# Altium footprint library AudioMoth 1.1.PCBLIB: 193 footprints (part 7 of 13)
Each footprint in its own frame and in the unit in brackets; x right, y up, seen from the top. Pads: shape width x height; smd on the part's side, far side on the other; paste and mask are expansions set on the pad; w line width, h text height; cw(c..) or ccw(c..) is an arc to the next point about the centre after c.
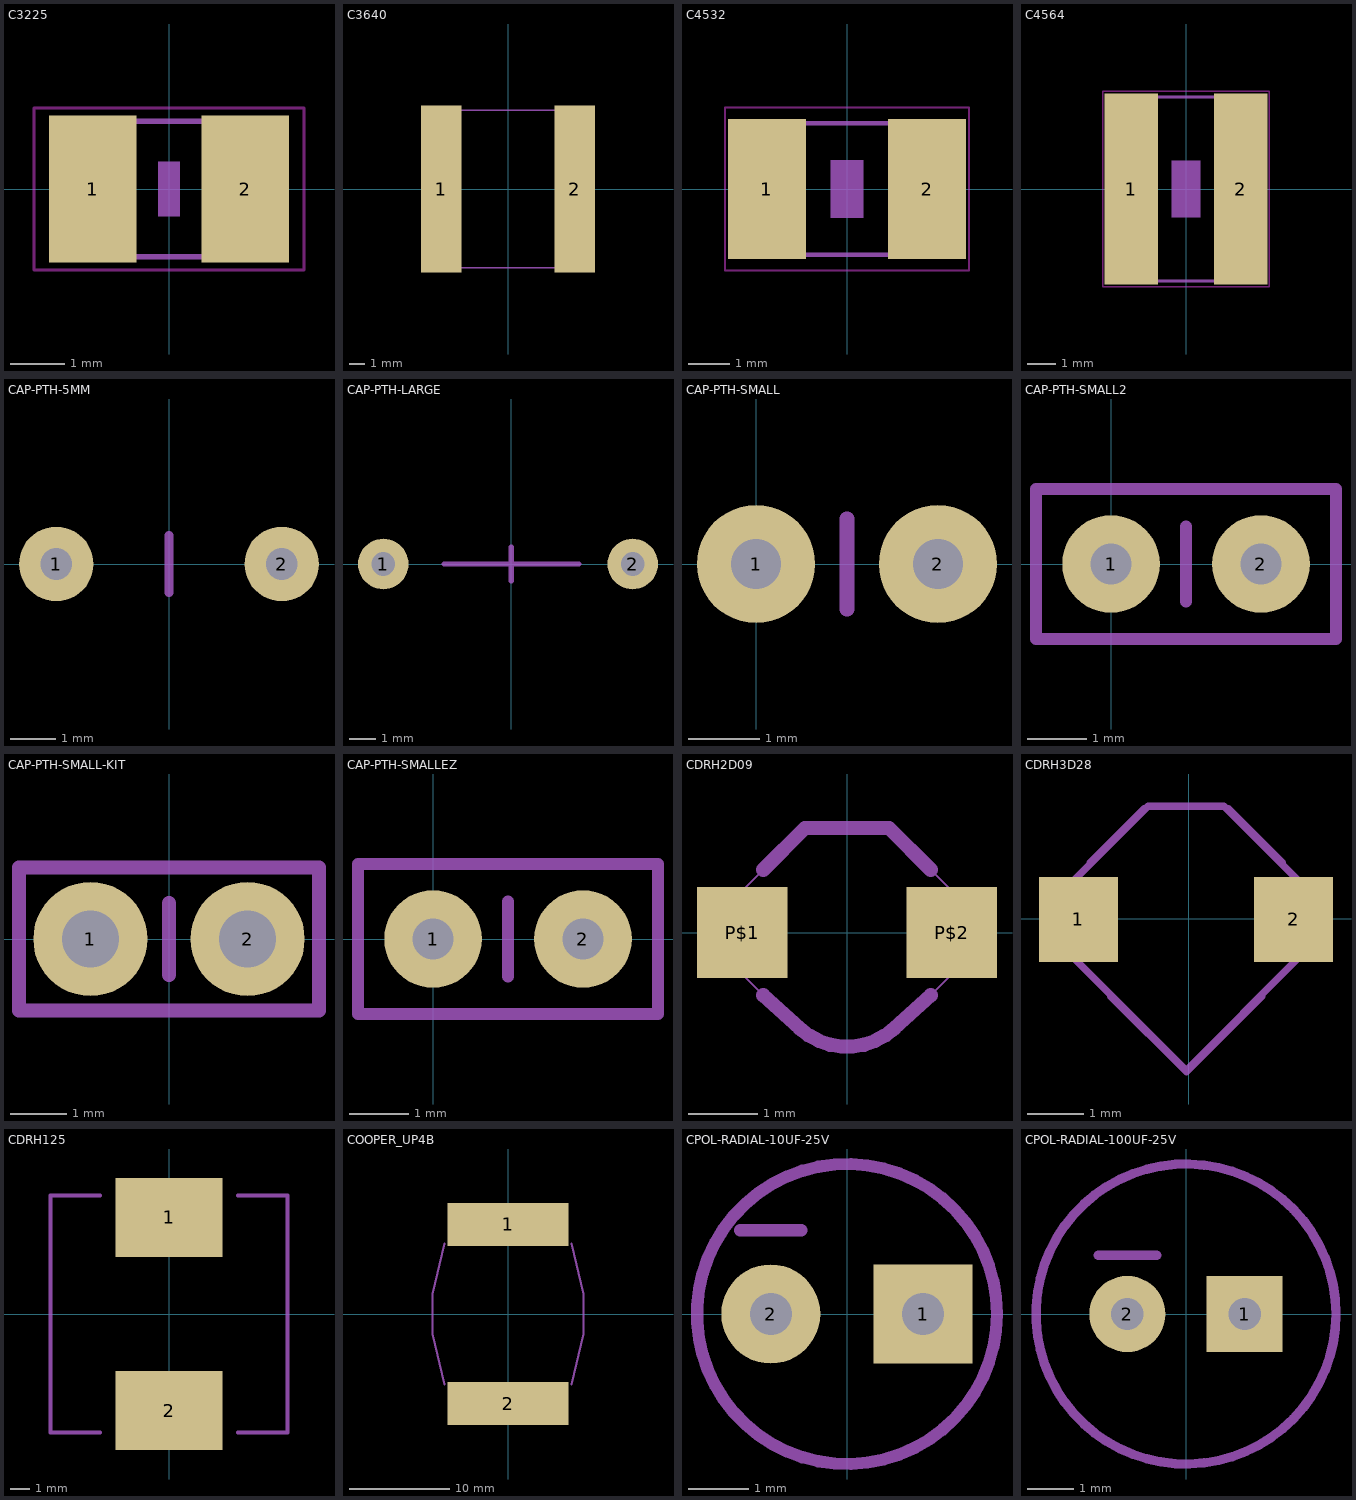
[diagram p6: the footprints below, top view; thin cyan lines are the x and y axes]

## C3225 [mm]
pads (2):
  rect 1.6x2.7 smd: 1(-1.4,0) 2(1.4,0)
Top keep-out:
  lines w0.051: -2.473,-1.483 2.473,-1.483 2.473,1.483 -2.473,1.483 -2.473,-1.483
tDocu:
  region: -1.702,-1.295 -1.702,1.305 -0.952,1.305 -0.952,-1.295
  region: 0.952,-1.305 0.952,1.295 1.702,1.295 1.702,-1.305
  lines w0.102: -0.965,-1.245 0.965,-1.245 ; -0.965,1.245 0.965,1.245
tGlue:
  region: -0.2,-0.5 -0.2,0.5 0.2,0.5 0.2,-0.5

## C3640 [mm]
pads (2):
  rect 2.6x10.7 smd: 1(-4.267,0) 2(4.267,0)
tDocu:
  region: -4.57,-5.1 -4.57,5.1 -3.05,5.1 -3.05,-5.1
  region: 3.05,-5.1 3.05,5.1 4.569,5.1 4.569,-5.1
  lines w0.102: -3.832,-5.05 3.832,-5.05 ; -3.832,5.05 3.832,5.05

## C4532 [mm]
pads (2):
  rect 1.9x3.4 smd: 1(-1.95,0) 2(1.95,0)
Top keep-out:
  lines w0.051: -2.973,-1.983 2.973,-1.983 2.973,1.983 -2.973,1.983 -2.973,-1.983
tDocu:
  region: -2.388,-1.651 -2.388,1.649 -1.438,1.649 -1.438,-1.651
  region: 1.448,-1.651 1.448,1.649 2.398,1.649 2.398,-1.651
  lines w0.102: -1.473,1.6 1.473,1.6 ; -1.448,-1.6 1.473,-1.6
tGlue:
  region: -0.4,-0.7 -0.4,0.7 0.4,0.7 0.4,-0.7

## C4564 [mm]
pads (2):
  rect 1.9x6.8 smd: 1(-1.95,0) 2(1.95,0)
Top keep-out:
  lines w0.051: -2.973,-3.483 2.973,-3.483 2.973,3.483 -2.973,3.483 -2.973,-3.483
tDocu:
  region: -2.413,-3.353 -2.413,3.347 -1.463,3.347 -1.463,-3.353
  region: 1.448,-3.353 1.448,3.347 2.398,3.347 2.398,-3.353
  lines w0.102: -1.499,3.277 1.473,3.277 ; -1.473,-3.277 1.499,-3.277
tGlue:
  region: -0.5,-1 -0.5,1 0.5,1 0.5,-1

## CAP-PTH-5MM [mil]
pads (2):
  round 65 hole 27.56: 1(-98.43,0) 2(98.43,0)
tPlace:
  lines w8: 0,-25 0,25

## CAP-PTH-LARGE [mil]
pads (2):
  round 75 hole 35.43: 1(-190,0) 2(180,0)
tPlace:
  lines w8: -100,0 0,0 ; 0,-25 0,0 ; 0,25 0,0 ; 100,0 0,0

## CAP-PTH-SMALL [mil]
pads (2):
  round 65 hole 27.56: 1(0,0) 2(100,0)
tPlace:
  lines w8: 50,-25 50,25

## CAP-PTH-SMALL2 [mil]
pads (2):
  round 65 hole 27.56: 1(0,0) 2(100,0)
tPlace:
  lines w8: 50,-25 50,25 ; -50,-50 150,-50 150,50 -50,50 -50,-50

## CAP-PTH-SMALL-KIT [mil]
pads (2):
  round 80 hole 40: 1(-55,0) 2(55,0)
Top Solder:
  region: -55.3,-17.3 -58.7,-17.38 -65.05,-14.92 -69.97,-10.23 -72.72,-4 -72.8,-0.6 -72.89,2.97 -70.32,9.64 -65.4,14.81 -58.87,17.71 -55.3,17.8 -51.78,17.74 -45.32,14.94 -40.42,9.87 -37.84,3.32 -37.9,-0.2 -37.93,-3.63 -40.61,-9.95 -45.51,-14.76 -51.87,-17.33 -55.3,-17.3
  region: 54.9,-17.3 51.5,-17.38 45.15,-14.92 40.23,-10.23 37.48,-4 37.4,-0.6 37.31,2.97 39.88,9.64 44.8,14.81 51.33,17.71 54.9,17.8 58.42,17.74 64.88,14.94 69.78,9.87 72.36,3.32 72.3,-0.2 72.27,-3.63 69.59,-9.95 64.69,-14.76 58.33,-17.33 54.9,-17.3
Bottom Solder:
  region: -55.2,-37.3 -58.85,-37.35 -66.04,-36.02 -72.83,-33.31 -78.96,-29.34 -84.2,-24.24 -88.34,-18.22 -91.23,-11.5 -92.75,-4.35 -92.8,-0.7 -92.84,3.04 -91.47,10.39 -88.7,17.33 -84.62,23.59 -79.39,28.94 -73.23,33.17 -66.35,36.11 -59.04,37.66 -55.3,37.7 -51.56,37.65 -44.25,36.08 -37.39,33.12 -31.23,28.88 -26.02,23.51 -21.96,17.24 -19.2,10.29 -17.85,2.94 -17.9,-0.8 -17.94,-4.43 -19.43,-11.55 -22.29,-18.23 -26.39,-24.24 -31.59,-29.32 -37.67,-33.29 -44.42,-36 -51.57,-37.34 -55.2,-37.3
  region: 55,-37.3 51.35,-37.35 44.16,-36.02 37.37,-33.31 31.24,-29.33 26.01,-24.24 21.87,-18.21 18.98,-11.5 17.46,-4.35 17.41,-0.7 17.36,3.04 18.73,10.39 21.51,17.33 25.59,23.59 30.81,28.94 36.98,33.17 43.85,36.11 51.16,37.66 54.9,37.7 58.64,37.65 65.95,36.08 72.81,33.12 78.97,28.88 84.18,23.51 88.24,17.24 91,10.29 92.35,2.94 92.3,-0.8 92.26,-4.43 90.77,-11.55 87.91,-18.23 83.81,-24.24 78.61,-29.32 72.53,-33.29 65.78,-36 58.63,-37.34 55,-37.3
tPlace:
  lines w10: 0,-25 0,25 ; -105,-50 105,-50 105,50 -105,50 -105,-50

## CAP-PTH-SMALLEZ [mil]
pads (2):
  round 65 hole 27.56: 1(0,0) 2(100,0)
Top Solder:
  circle w0: c0,0 r15.81
  circle w0: c100,0 r15.81
Bottom Solder:
  circle w0: c0,0 r35.36
  circle w0: c100,0 r36.06
tPlace:
  lines w8: 50,-25 50,25 ; -50,-50 150,-50 150,50 -50,50 -50,-50

## CDRH2D09 [mm]
pads (2):
  rect 1.3x1.3 smd: P$1(-1.5,0) P$2(1.5,0)
tDocu:
  lines w0.03: -1.5,-0.6 -0.707,-1.393 ccw(c0,-0.686) 0.707,-1.393 1.5,-0.6 1.5,0.6 0.6,1.5 -0.6,1.5 -1.5,0.6 -1.5,-0.6
tPlace:
  lines w0.203: -1.2,-0.9 -0.678,-1.374 ccw(c0,-0.639) 0.678,-1.374 1.2,-0.9 ; -1.2,0.9 -0.6,1.5 0.6,1.5 1.2,0.9

## CDRH3D28 [mm]
pads (2):
  rect 1.4x1.5 smd: 1(-1.95,-0.007) 2(1.849,-0.007)
tDocu:
  lines w0.127: -2.05,-0.677 -2.051,0.663 -0.721,1.993 0.619,1.993 1.949,0.663 1.949,-0.677 ; -2.043,-0.68 -0.054,-2.67 ; -0.051,-2.675 1.95,-0.674
tPlace:
  lines w0.127: -1.743,1 -0.789,1.954 ; -1.378,-1.365 -0.044,-2.7 1.291,-1.365 ; 0.702,1.954 1.656,1

## CDRH125 [mm]
pads (2):
  rect 5.4x4 smd: 1(0,4.9) 2(0,-4.9)
tPlace:
  lines w0.203: -3.5,-6 -6,-6 -6,6 -3.5,6 ; 3.5,-6 6,-6 6,6 3.5,6

## COOPER_UP4B [mm]
pads (2):
  rect 12x4.3 smd: 1(0,8.9) 2(0,-8.9)
tPlace:
  lines w0.203: -6.3,-7 -7.5,-2 -7.5,2 -6.3,7 ; 6.3,-7 7.5,-2 7.5,2 6.3,7

## CPOL-RADIAL-10UF-25V [mil]
pads (2):
  rect 65x65 / inner round 60.05 / far side rect 65x65 hole 27.56: 1(50,0)
  round 65 hole 27.56: 2(-50,0)
tPlace:
  circle w8: c0,0 r98.43
  lines w8: -70,55 -30,55

## CPOL-RADIAL-100UF-25V [mil]
pads (2):
  rect 65x65 / inner round 60.05 / far side rect 65x65 hole 27.56: 1(50,0)
  round 65 hole 27.56: 2(-50,0)
tPlace:
  circle w8: c0,0 r127.95
  lines w8: -75,50 -25,50